# Altium footprint library SFH213FA.PcbLib: 1 footprints
Each footprint in its own frame and in the unit in brackets; x right, y up, seen from the top. Pads: shape width x height; smd on the part's side, far side on the other; paste and mask are expansions set on the pad; w line width, h text height; cw(c..) or ccw(c..) is an arc to the next point about the centre after c.
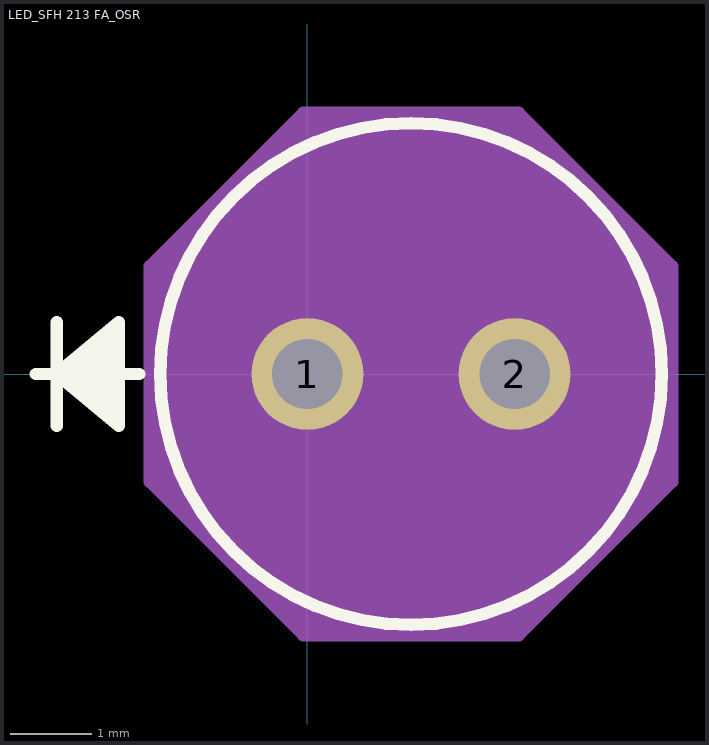
[diagram p0: the footprint, top view; thin cyan lines are the x and y axes]

## LED_SFH 213 FA_OSR [mil]
pads (2):
  round 54 hole 34 paste-27 mask+0: 1(0,0) 2(100,0)
Top Overlay:
  circle w6: c50,0 r121
  lines w6: -131,0 -81,0 ; -121,-25 -121,25 ; -91,-20 -121,0 ; -91,-15 -121,0 ; -91,-10 -121,0 ; -91,-5 -121,0 ; -91,5 -121,0 ; -91,10 -121,0 ; -91,15 -121,0 ; -91,20 -121,0 ; -121,0 -91,25 -91,-25 -121,0
  text ".Designator" at -87.5,-25 h50
Mechanical 13:
  circle w1: c50,0 r116
  lines w1: -131,0 -81,0 ; -121,-25 -121,25 ; -91,-20 -121,0 ; -91,-15 -121,0 ; -91,-10 -121,0 ; -91,-5 -121,0 ; -91,5 -121,0 ; -91,10 -121,0 ; -91,15 -121,0 ; -91,20 -121,0 ; -121,0 -91,25 -91,-25 -121,0
  text ".Designator" at -87.5,-25 h50
Mechanical 15:
  region: -76,51.88 -1.88,126 101.88,126 176,51.88 176,-51.88 101.88,-126 -1.88,-126 -76,-51.88
  lines w6: -76,-51.88 -1.88,-126 101.88,-126 176,-51.88 176,51.88 101.88,126 -1.88,126 -76,51.88 -76,-51.88
3D body "LED_SFH213FA_OSR.step": height 354.61, standoff -172.01, extent -66.36,-115.88 165.53,115.88